# Altium footprint library IC-QFN.PcbLib: 94 footprints (part 6 of 6)
Each footprint in its own frame and in the unit in brackets; x right, y up, seen from the top. Pads: shape width x height; smd on the part's side, far side on the other; paste and mask are expansions set on the pad; w line width, h text height; cw(c..) or ccw(c..) is an arc to the next point about the centre after c.
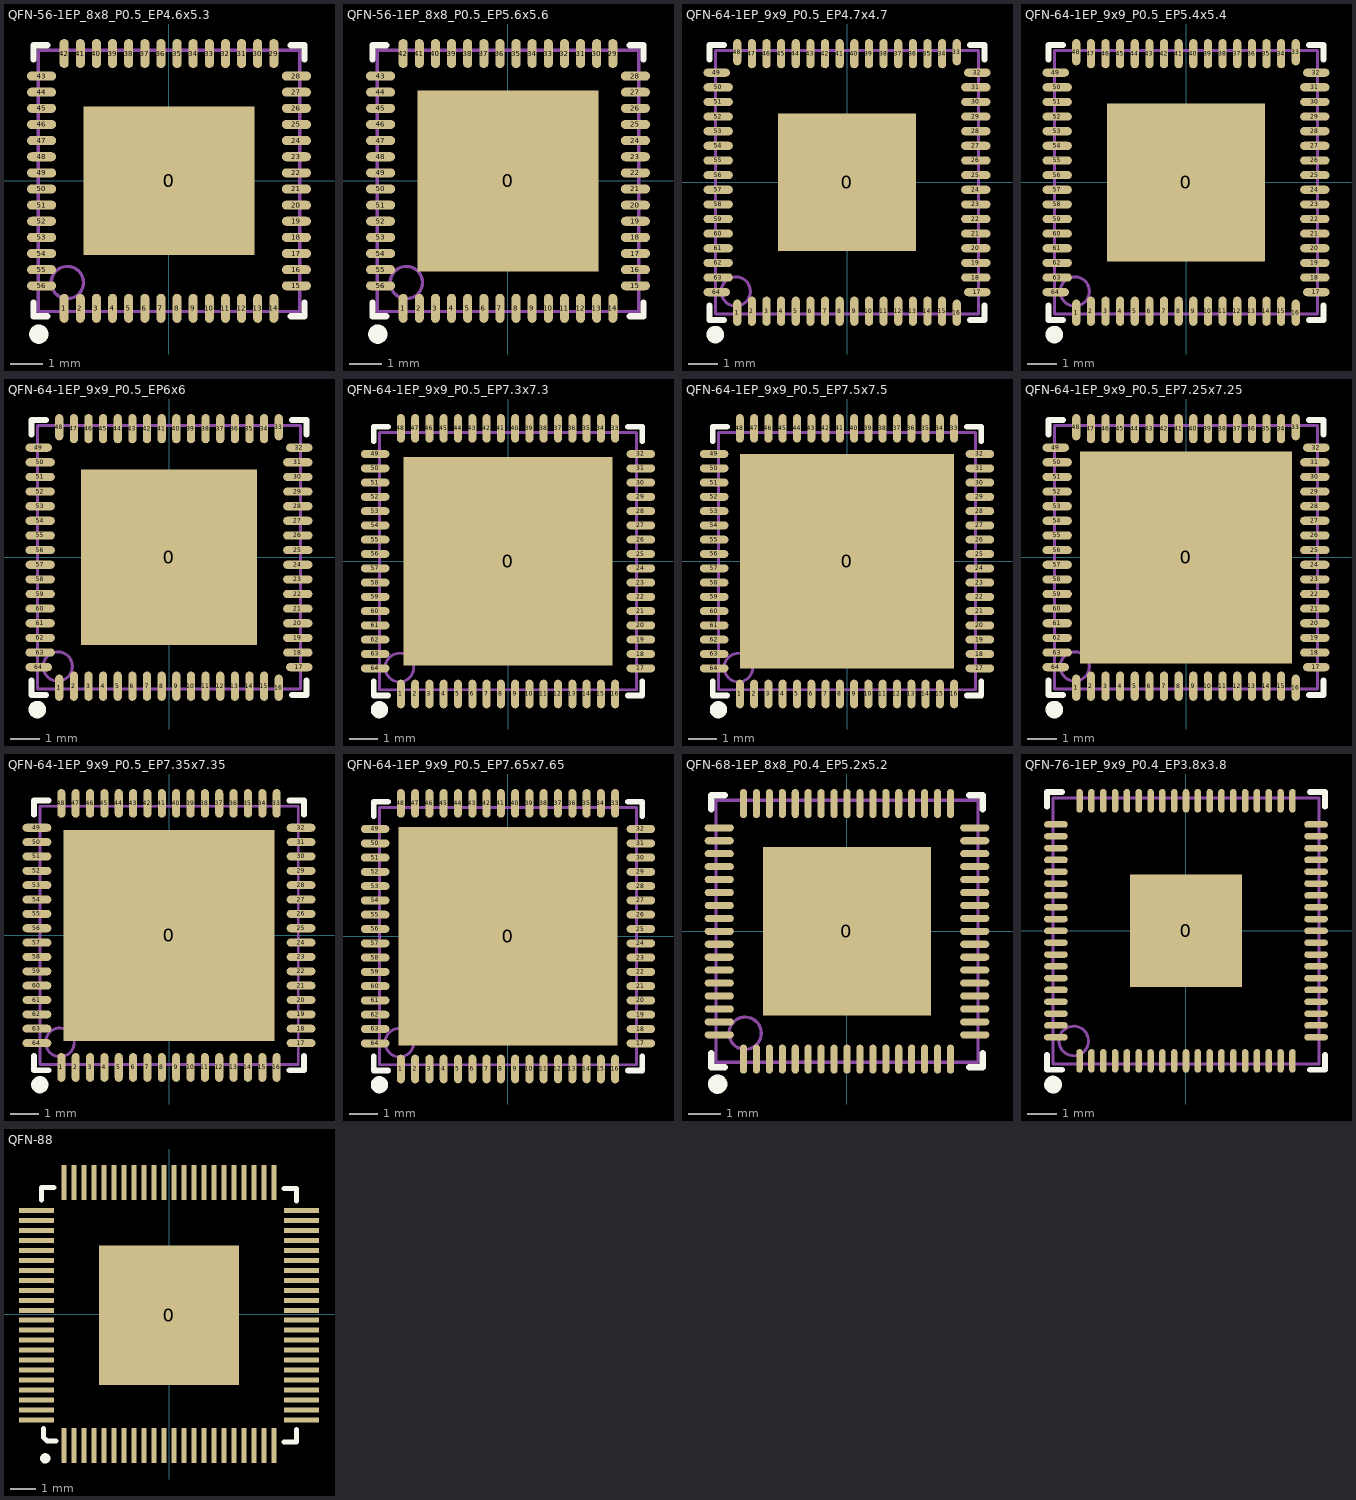
[diagram p5: the footprints below, top view; thin cyan lines are the x and y axes]

## QFN-56-1EP_8x8_P0.5_EP4.6x5.3 [mm]
pads (57):
  rect 5.3x4.6 smd mask+0.051: 0(0,0)
  oval 0.28x0.9 smd mask+0.051: 1(-3.25,-3.95) 2(-2.75,-3.95) 3(-2.25,-3.95) 4(-1.75,-3.95) 5(-1.25,-3.95) 6(-0.75,-3.95) 7(-0.25,-3.95) 8(0.25,-3.95) 9(0.75,-3.95) 10(1.25,-3.95) 11(1.75,-3.95) 12(2.25,-3.95) 13(2.75,-3.95) 14(3.25,-3.95) 29(3.25,3.95) 30(2.75,3.95) 31(2.25,3.95) 32(1.75,3.95) 33(1.25,3.95) 34(0.75,3.95) 35(0.25,3.95) 36(-0.25,3.95) 37(-0.75,3.95) 38(-1.25,3.95) 39(-1.75,3.95) 40(-2.25,3.95) 41(-2.75,3.95) 42(-3.25,3.95)
  oval 0.9x0.28 smd mask+0.051: 15(3.95,-3.25) 16(3.95,-2.75) 17(3.95,-2.25) 18(3.95,-1.75) 19(3.95,-1.25) 20(3.95,-0.75) 21(3.95,-0.25) 22(3.95,0.25) 23(3.95,0.75) 24(3.95,1.25) 25(3.95,1.75) 26(3.95,2.25) 27(3.95,2.75) 28(3.95,3.25) 43(-3.95,3.25) 44(-3.95,2.75) 45(-3.95,2.25) 46(-3.95,1.75) 47(-3.95,1.25) 48(-3.95,0.75) 49(-3.95,0.25) 50(-3.95,-0.25) 51(-3.95,-0.75) 52(-3.95,-1.25) 53(-3.95,-1.75) 54(-3.95,-2.25) 55(-3.95,-2.75) 56(-3.95,-3.25)
Top Overlay:
  circle w0.3: c-4.035,-4.75 r0.15
  lines w0.2: -4.2,-3.775 -4.2,-4.2 -3.775,-4.2 ; -4.2,3.775 -4.2,4.2 -3.775,4.2 ; 3.775,-4.2 4.2,-4.2 4.2,-3.775 ; 3.775,4.2 4.2,4.2 4.2,3.775
Mechanical 13:
  circle w0.1: c-3.15,-3.15 r0.5
  lines w0.1: -4.05,-4.05 4.05,-4.05 4.05,4.05 -4.05,4.05 -4.05,-4.05
3D body "QFN-56-1EP_8x8mm_P0.5mm_EP4.6x5.3mm.step": height 1.1, standoff 0, extent -4,-4 4,4

## QFN-56-1EP_8x8_P0.5_EP5.6x5.6 [mm]
pads (57):
  rect 5.6x5.6 smd mask+0.051: 0(0,0)
  oval 0.28x0.9 smd mask+0.051: 1(-3.25,-3.95) 2(-2.75,-3.95) 3(-2.25,-3.95) 4(-1.75,-3.95) 5(-1.25,-3.95) 6(-0.75,-3.95) 7(-0.25,-3.95) 8(0.25,-3.95) 9(0.75,-3.95) 10(1.25,-3.95) 11(1.75,-3.95) 12(2.25,-3.95) 13(2.75,-3.95) 14(3.25,-3.95) 29(3.25,3.95) 30(2.75,3.95) 31(2.25,3.95) 32(1.75,3.95) 33(1.25,3.95) 34(0.75,3.95) 35(0.25,3.95) 36(-0.25,3.95) 37(-0.75,3.95) 38(-1.25,3.95) 39(-1.75,3.95) 40(-2.25,3.95) 41(-2.75,3.95) 42(-3.25,3.95)
  oval 0.9x0.28 smd mask+0.051: 15(3.95,-3.25) 16(3.95,-2.75) 17(3.95,-2.25) 18(3.95,-1.75) 19(3.95,-1.25) 20(3.95,-0.75) 21(3.95,-0.25) 22(3.95,0.25) 23(3.95,0.75) 24(3.95,1.25) 25(3.95,1.75) 26(3.95,2.25) 27(3.95,2.75) 28(3.95,3.25) 43(-3.95,3.25) 44(-3.95,2.75) 45(-3.95,2.25) 46(-3.95,1.75) 47(-3.95,1.25) 48(-3.95,0.75) 49(-3.95,0.25) 50(-3.95,-0.25) 51(-3.95,-0.75) 52(-3.95,-1.25) 53(-3.95,-1.75) 54(-3.95,-2.25) 55(-3.95,-2.75) 56(-3.95,-3.25)
Top Overlay:
  circle w0.3: c-4.035,-4.75 r0.15
  lines w0.2: -4.2,-3.775 -4.2,-4.2 -3.775,-4.2 ; -4.2,3.775 -4.2,4.2 -3.775,4.2 ; 3.775,-4.2 4.2,-4.2 4.2,-3.775 ; 3.775,4.2 4.2,4.2 4.2,3.775
Mechanical 13:
  circle w0.1: c-3.15,-3.15 r0.5
  lines w0.1: -4.05,-4.05 -4.05,4.05 4.05,4.05 4.05,-4.05 -4.05,-4.05
3D body "QFN-56-1EP_8x8mm_P0.5mm_EP5.6x5.6mm.step": height 1.1, standoff 0, extent -4,-4 4,4

## QFN-64-1EP_8x8_P0.4_EP6.5x6.5 [mm]

## QFN-64-1EP_9x9_P0.5_EP4.7x4.7 [mm]
pads (65):
  rect 4.7x4.7 smd mask+0.051: 0(0,0)
  oval 0.28x0.9 smd mask+0.051: 1(-3.75,-4.45) 16(3.75,-4.45) 33(3.75,4.45) 48(-3.75,4.45)
  oval 0.28x1 smd mask+0.051: 2(-3.25,-4.4) 3(-2.75,-4.4) 4(-2.25,-4.4) 5(-1.75,-4.4) 6(-1.25,-4.4) 7(-0.75,-4.4) 8(-0.25,-4.4) 9(0.25,-4.4) 10(0.75,-4.4) 11(1.25,-4.4) 12(1.75,-4.4) 13(2.25,-4.4) 14(2.75,-4.4) 15(3.25,-4.4) 34(3.25,4.4) 35(2.75,4.4) 36(2.25,4.4) 37(1.75,4.4) 38(1.25,4.4) 39(0.75,4.4) 40(0.25,4.4) 41(-0.25,4.4) 42(-0.75,4.4) 43(-1.25,4.4) 44(-1.75,4.4) 45(-2.25,4.4) 46(-2.75,4.4) 47(-3.25,4.4)
  oval 0.9x0.28 smd mask+0.051: 17(4.45,-3.75) 32(4.45,3.75) 49(-4.45,3.75) 64(-4.45,-3.75)
  oval 1x0.28 smd mask+0.051: 18(4.4,-3.25) 19(4.4,-2.75) 20(4.4,-2.25) 21(4.4,-1.75) 22(4.4,-1.25) 23(4.4,-0.75) 24(4.4,-0.25) 25(4.4,0.25) 26(4.4,0.75) 27(4.4,1.25) 28(4.4,1.75) 29(4.4,2.25) 30(4.4,2.75) 31(4.4,3.25) 50(-4.4,3.25) 51(-4.4,2.75) 52(-4.4,2.25) 53(-4.4,1.75) 54(-4.4,1.25) 55(-4.4,0.75) 56(-4.4,0.25) 57(-4.4,-0.25) 58(-4.4,-0.75) 59(-4.4,-1.25) 60(-4.4,-1.75) 61(-4.4,-2.25) 62(-4.4,-2.75) 63(-4.4,-3.25)
Top Overlay:
  circle w0.3: c-4.5,-5.2 r0.15
  lines w0.2: -4.7,-4.2 -4.7,-4.7 -4.2,-4.7 ; -4.7,4.2 -4.7,4.7 -4.2,4.7 ; 4.2,-4.7 4.7,-4.7 4.7,-4.2 ; 4.2,4.7 4.7,4.7 4.7,4.2
Mechanical 13:
  circle w0.1: c-3.8,-3.725 r0.5
  lines w0.1: -4.5,-4.5 4.5,-4.5 4.5,4.5 -4.5,4.5 -4.5,-4.5
3D body "QFN-64-1EP_9x9mm_P0.5mm_EP4.7x4.7mm.step": height 1.1, standoff 0, extent -4.5,-4.5 4.5,4.5

## QFN-64-1EP_9x9_P0.5_EP5.4x5.4 [mm]
pads (65):
  rect 5.4x5.4 smd mask+0.051: 0(0,0)
  oval 0.28x0.9 smd mask+0.051: 1(-3.75,-4.45) 16(3.75,-4.45) 33(3.75,4.45) 48(-3.75,4.45)
  oval 0.28x1 smd mask+0.051: 2(-3.25,-4.4) 3(-2.75,-4.4) 4(-2.25,-4.4) 5(-1.75,-4.4) 6(-1.25,-4.4) 7(-0.75,-4.4) 8(-0.25,-4.4) 9(0.25,-4.4) 10(0.75,-4.4) 11(1.25,-4.4) 12(1.75,-4.4) 13(2.25,-4.4) 14(2.75,-4.4) 15(3.25,-4.4) 34(3.25,4.4) 35(2.75,4.4) 36(2.25,4.4) 37(1.75,4.4) 38(1.25,4.4) 39(0.75,4.4) 40(0.25,4.4) 41(-0.25,4.4) 42(-0.75,4.4) 43(-1.25,4.4) 44(-1.75,4.4) 45(-2.25,4.4) 46(-2.75,4.4) 47(-3.25,4.4)
  oval 0.9x0.28 smd mask+0.051: 17(4.45,-3.75) 32(4.45,3.75) 49(-4.45,3.75) 64(-4.45,-3.75)
  oval 1x0.28 smd mask+0.051: 18(4.4,-3.25) 19(4.4,-2.75) 20(4.4,-2.25) 21(4.4,-1.75) 22(4.4,-1.25) 23(4.4,-0.75) 24(4.4,-0.25) 25(4.4,0.25) 26(4.4,0.75) 27(4.4,1.25) 28(4.4,1.75) 29(4.4,2.25) 30(4.4,2.75) 31(4.4,3.25) 50(-4.4,3.25) 51(-4.4,2.75) 52(-4.4,2.25) 53(-4.4,1.75) 54(-4.4,1.25) 55(-4.4,0.75) 56(-4.4,0.25) 57(-4.4,-0.25) 58(-4.4,-0.75) 59(-4.4,-1.25) 60(-4.4,-1.75) 61(-4.4,-2.25) 62(-4.4,-2.75) 63(-4.4,-3.25)
Top Overlay:
  circle w0.3: c-4.5,-5.2 r0.15
  lines w0.2: -4.7,-4.2 -4.7,-4.7 -4.2,-4.7 ; -4.7,4.2 -4.7,4.7 -4.2,4.7 ; 4.2,-4.7 4.7,-4.7 4.7,-4.2 ; 4.2,4.7 4.7,4.7 4.7,4.2
Mechanical 13:
  circle w0.1: c-3.8,-3.725 r0.5
  lines w0.1: -4.5,-4.5 4.5,-4.5 4.5,4.5 -4.5,4.5 -4.5,-4.5
3D body "QFN-64-1EP_9x9mm_P0.5mm_EP5.4x5.4mm.step": height 1.1, standoff 0, extent -4.5,-4.5 4.5,4.5

## QFN-64-1EP_9x9_P0.5_EP6x6 [mm]
pads (65):
  rect 6x6 smd mask+0.051: 0(0,0)
  oval 0.28x0.9 smd mask+0.051: 1(-3.75,-4.45) 16(3.75,-4.45) 33(3.75,4.45) 48(-3.75,4.45)
  oval 0.28x1 smd mask+0.051: 2(-3.25,-4.4) 3(-2.75,-4.4) 4(-2.25,-4.4) 5(-1.75,-4.4) 6(-1.25,-4.4) 7(-0.75,-4.4) 8(-0.25,-4.4) 9(0.25,-4.4) 10(0.75,-4.4) 11(1.25,-4.4) 12(1.75,-4.4) 13(2.25,-4.4) 14(2.75,-4.4) 15(3.25,-4.4) 34(3.25,4.4) 35(2.75,4.4) 36(2.25,4.4) 37(1.75,4.4) 38(1.25,4.4) 39(0.75,4.4) 40(0.25,4.4) 41(-0.25,4.4) 42(-0.75,4.4) 43(-1.25,4.4) 44(-1.75,4.4) 45(-2.25,4.4) 46(-2.75,4.4) 47(-3.25,4.4)
  oval 0.9x0.28 smd mask+0.051: 17(4.45,-3.75) 32(4.45,3.75) 49(-4.45,3.75) 64(-4.45,-3.75)
  oval 1x0.28 smd mask+0.051: 18(4.4,-3.25) 19(4.4,-2.75) 20(4.4,-2.25) 21(4.4,-1.75) 22(4.4,-1.25) 23(4.4,-0.75) 24(4.4,-0.25) 25(4.4,0.25) 26(4.4,0.75) 27(4.4,1.25) 28(4.4,1.75) 29(4.4,2.25) 30(4.4,2.75) 31(4.4,3.25) 50(-4.4,3.25) 51(-4.4,2.75) 52(-4.4,2.25) 53(-4.4,1.75) 54(-4.4,1.25) 55(-4.4,0.75) 56(-4.4,0.25) 57(-4.4,-0.25) 58(-4.4,-0.75) 59(-4.4,-1.25) 60(-4.4,-1.75) 61(-4.4,-2.25) 62(-4.4,-2.75) 63(-4.4,-3.25)
Top Overlay:
  circle w0.3: c-4.5,-5.2 r0.15
  lines w0.2: -4.7,-4.2 -4.7,-4.7 -4.2,-4.7 ; -4.7,4.2 -4.7,4.7 -4.2,4.7 ; 4.2,-4.7 4.7,-4.7 4.7,-4.2 ; 4.2,4.7 4.7,4.7 4.7,4.2
Mechanical 13:
  circle w0.1: c-3.8,-3.725 r0.5
  lines w0.1: -4.5,-4.5 -4.5,4.5 4.5,4.5 4.5,-4.5 -4.5,-4.5
3D body "QFN-64-1EP_9x9mm_P0.5mm_EP6x6mm.step": height 1.1, standoff 0, extent -4.5,-4.5 4.5,4.5

## QFN-64-1EP_9x9_P0.5_EP7.3x7.3 [mm]
pads (65):
  rect 7.3x7.3 smd mask+0.102: 0(0,0)
  oval 0.28x1 smd mask+0.051: 1(-3.75,-4.65) 2(-3.25,-4.65) 3(-2.75,-4.65) 4(-2.25,-4.65) 5(-1.75,-4.65) 6(-1.25,-4.65) 7(-0.75,-4.65) 8(-0.25,-4.65) 9(0.25,-4.65) 10(0.75,-4.65) 11(1.25,-4.65) 12(1.75,-4.65) 13(2.25,-4.65) 14(2.75,-4.65) 15(3.25,-4.65) 16(3.75,-4.65) 33(3.75,4.65) 34(3.25,4.65) 35(2.75,4.65) 36(2.25,4.65) 37(1.75,4.65) 38(1.25,4.65) 39(0.75,4.65) 40(0.25,4.65) 41(-0.25,4.65) 42(-0.75,4.65) 43(-1.25,4.65) 44(-1.75,4.65) 45(-2.25,4.65) 46(-2.75,4.65) 47(-3.25,4.65) 48(-3.75,4.65)
  oval 1x0.28 smd mask+0.051: 17(4.65,-3.75) 18(4.65,-3.25) 19(4.65,-2.75) 20(4.65,-2.25) 21(4.65,-1.75) 22(4.65,-1.25) 23(4.65,-0.75) 24(4.65,-0.25) 25(4.65,0.25) 26(4.65,0.75) 27(4.65,1.25) 28(4.65,1.75) 29(4.65,2.25) 30(4.65,2.75) 31(4.65,3.25) 32(4.65,3.75) 49(-4.65,3.75) 50(-4.65,3.25) 51(-4.65,2.75) 52(-4.65,2.25) 53(-4.65,1.75) 54(-4.65,1.25) 55(-4.65,0.75) 56(-4.65,0.25) 57(-4.65,-0.25) 58(-4.65,-0.75) 59(-4.65,-1.25) 60(-4.65,-1.75) 61(-4.65,-2.25) 62(-4.65,-2.75) 63(-4.65,-3.25) 64(-4.65,-3.75)
Top Overlay:
  circle w0.3: c-4.5,-5.2 r0.15
  lines w0.2: -4.7,-4.2 -4.7,-4.7 -4.2,-4.7 ; -4.7,4.2 -4.7,4.7 -4.2,4.7 ; 4.2,-4.7 4.7,-4.7 4.7,-4.2 ; 4.2,4.7 4.7,4.7 4.7,4.2
Mechanical 13:
  circle w0.1: c-3.8,-3.725 r0.5
  lines w0.1: -4.5,-4.5 -4.5,4.5 4.5,4.5 4.5,-4.5 -4.5,-4.5
3D body "QFN-64-1EP_9x9mm_P0.5mm_EP7.3x7.3mm.step": height 1.1, standoff 0, extent -4.5,-4.5 4.5,4.5

## QFN-64-1EP_9x9_P0.5_EP7.5x7.5 [mm]
pads (65):
  rect 7.5x7.5 smd mask+0.051: 0(0,0)
  oval 0.28x1 smd mask+0.051: 1(-3.75,-4.65) 2(-3.25,-4.65) 3(-2.75,-4.65) 4(-2.25,-4.65) 5(-1.75,-4.65) 6(-1.25,-4.65) 7(-0.75,-4.65) 8(-0.25,-4.65) 9(0.25,-4.65) 10(0.75,-4.65) 11(1.25,-4.65) 12(1.75,-4.65) 13(2.25,-4.65) 14(2.75,-4.65) 15(3.25,-4.65) 16(3.75,-4.65) 33(3.75,4.65) 34(3.25,4.65) 35(2.75,4.65) 36(2.25,4.65) 37(1.75,4.65) 38(1.25,4.65) 39(0.75,4.65) 40(0.25,4.65) 41(-0.25,4.65) 42(-0.75,4.65) 43(-1.25,4.65) 44(-1.75,4.65) 45(-2.25,4.65) 46(-2.75,4.65) 47(-3.25,4.65) 48(-3.75,4.65)
  oval 1x0.28 smd mask+0.051: 17(4.65,-3.75) 18(4.65,-3.25) 19(4.65,-2.75) 20(4.65,-2.25) 21(4.65,-1.75) 22(4.65,-1.25) 23(4.65,-0.75) 24(4.65,-0.25) 25(4.65,0.25) 26(4.65,0.75) 27(4.65,1.25) 28(4.65,1.75) 29(4.65,2.25) 30(4.65,2.75) 31(4.65,3.25) 32(4.65,3.75) 49(-4.65,3.75) 50(-4.65,3.25) 51(-4.65,2.75) 52(-4.65,2.25) 53(-4.65,1.75) 54(-4.65,1.25) 55(-4.65,0.75) 56(-4.65,0.25) 57(-4.65,-0.25) 58(-4.65,-0.75) 59(-4.65,-1.25) 60(-4.65,-1.75) 61(-4.65,-2.25) 62(-4.65,-2.75) 63(-4.65,-3.25) 64(-4.65,-3.75)
Top Overlay:
  circle w0.3: c-4.5,-5.2 r0.15
  lines w0.2: -4.7,-4.2 -4.7,-4.7 -4.2,-4.7 ; -4.7,4.2 -4.7,4.7 -4.2,4.7 ; 4.2,-4.7 4.7,-4.7 4.7,-4.2 ; 4.2,4.7 4.7,4.7 4.7,4.2
Mechanical 13:
  circle w0.1: c-3.8,-3.725 r0.5
  lines w0.1: -4.5,-4.5 -4.5,4.5 4.5,4.5 4.5,-4.5 -4.5,-4.5
3D body "QFN-64-1EP_9x9mm_P0.5mm_EP7.5x7.5mm.step": height 1.1, standoff 0, extent -4.5,-4.5 4.5,4.5

## QFN-64-1EP_9x9_P0.5_EP7.25x7.25 [mm]
pads (65):
  rect 7.25x7.25 smd mask+0.051: 0(0,0)
  oval 0.28x0.9 smd mask+0.051: 1(-3.75,-4.45) 16(3.75,-4.45) 33(3.75,4.45) 48(-3.75,4.45)
  oval 0.28x1 smd mask+0.051: 2(-3.25,-4.4) 3(-2.75,-4.4) 4(-2.25,-4.4) 5(-1.75,-4.4) 6(-1.25,-4.4) 7(-0.75,-4.4) 8(-0.25,-4.4) 9(0.25,-4.4) 10(0.75,-4.4) 11(1.25,-4.4) 12(1.75,-4.4) 13(2.25,-4.4) 14(2.75,-4.4) 15(3.25,-4.4) 34(3.25,4.4) 35(2.75,4.4) 36(2.25,4.4) 37(1.75,4.4) 38(1.25,4.4) 39(0.75,4.4) 40(0.25,4.4) 41(-0.25,4.4) 42(-0.75,4.4) 43(-1.25,4.4) 44(-1.75,4.4) 45(-2.25,4.4) 46(-2.75,4.4) 47(-3.25,4.4)
  oval 0.9x0.28 smd mask+0.051: 17(4.45,-3.75) 32(4.45,3.75) 49(-4.45,3.75) 64(-4.45,-3.75)
  oval 1x0.28 smd mask+0.051: 18(4.4,-3.25) 19(4.4,-2.75) 20(4.4,-2.25) 21(4.4,-1.75) 22(4.4,-1.25) 23(4.4,-0.75) 24(4.4,-0.25) 25(4.4,0.25) 26(4.4,0.75) 27(4.4,1.25) 28(4.4,1.75) 29(4.4,2.25) 30(4.4,2.75) 31(4.4,3.25) 50(-4.4,3.25) 51(-4.4,2.75) 52(-4.4,2.25) 53(-4.4,1.75) 54(-4.4,1.25) 55(-4.4,0.75) 56(-4.4,0.25) 57(-4.4,-0.25) 58(-4.4,-0.75) 59(-4.4,-1.25) 60(-4.4,-1.75) 61(-4.4,-2.25) 62(-4.4,-2.75) 63(-4.4,-3.25)
Top Overlay:
  circle w0.3: c-4.5,-5.2 r0.15
  lines w0.2: -4.7,-4.2 -4.7,-4.7 -4.2,-4.7 ; -4.7,4.2 -4.7,4.7 -4.2,4.7 ; 4.2,-4.7 4.7,-4.7 4.7,-4.2 ; 4.2,4.7 4.7,4.7 4.7,4.2
Mechanical 13:
  circle w0.1: c-3.8,-3.725 r0.5
  lines w0.1: -4.5,-4.5 4.5,-4.5 4.5,4.5 -4.5,4.5 -4.5,-4.5
3D body "QFN-64-1EP_9x9mm_P0.5mm_EP7.25x7.25mm.step": height 1.1, standoff 0, extent -4.5,-4.5 4.5,4.5

## QFN-64-1EP_9x9_P0.5_EP7.35x7.35 [mm]
pads (65):
  rect 7.35x7.35 smd mask+0.051: 0(0,0)
  oval 0.28x1 smd mask+0.051: 1(-3.75,-4.6) 2(-3.25,-4.6) 3(-2.75,-4.6) 4(-2.25,-4.6) 5(-1.75,-4.6) 6(-1.25,-4.6) 7(-0.75,-4.6) 8(-0.25,-4.6) 9(0.25,-4.6) 10(0.75,-4.6) 11(1.25,-4.6) 12(1.75,-4.6) 13(2.25,-4.6) 14(2.75,-4.6) 15(3.25,-4.6) 16(3.75,-4.6) 33(3.75,4.6) 34(3.25,4.6) 35(2.75,4.6) 36(2.25,4.6) 37(1.75,4.6) 38(1.25,4.6) 39(0.75,4.6) 40(0.25,4.6) 41(-0.25,4.6) 42(-0.75,4.6) 43(-1.25,4.6) 44(-1.75,4.6) 45(-2.25,4.6) 46(-2.75,4.6) 47(-3.25,4.6) 48(-3.75,4.6)
  oval 1x0.28 smd mask+0.051: 17(4.6,-3.75) 18(4.6,-3.25) 19(4.6,-2.75) 20(4.6,-2.25) 21(4.6,-1.75) 22(4.6,-1.25) 23(4.6,-0.75) 24(4.6,-0.25) 25(4.6,0.25) 26(4.6,0.75) 27(4.6,1.25) 28(4.6,1.75) 29(4.6,2.25) 30(4.6,2.75) 31(4.6,3.25) 32(4.6,3.75) 49(-4.6,3.75) 50(-4.6,3.25) 51(-4.6,2.75) 52(-4.6,2.25) 53(-4.6,1.75) 54(-4.6,1.25) 55(-4.6,0.75) 56(-4.6,0.25) 57(-4.6,-0.25) 58(-4.6,-0.75) 59(-4.6,-1.25) 60(-4.6,-1.75) 61(-4.6,-2.25) 62(-4.6,-2.75) 63(-4.6,-3.25) 64(-4.6,-3.75)
Top Overlay:
  circle w0.3: c-4.5,-5.2 r0.15
  lines w0.2: -4.7,-4.2 -4.7,-4.7 -4.2,-4.7 ; -4.7,4.2 -4.7,4.7 -4.2,4.7 ; 4.2,-4.7 4.7,-4.7 4.7,-4.2 ; 4.2,4.7 4.7,4.7 4.7,4.2
Mechanical 13:
  circle w0.1: c-3.8,-3.725 r0.5
  lines w0.1: -4.5,-4.5 4.5,-4.5 4.5,4.5 -4.5,4.5 -4.5,-4.5
3D body "QFN-64-1EP_9x9mm_P0.5mm_EP7.35x7.35mm.step": height 0.75, standoff 0, extent -4.5,-4.5 4.5,4.5

## QFN-64-1EP_9x9_P0.5_EP7.65x7.65 [mm]
pads (65):
  rect 7.65x7.65 smd mask+0.051: 0(0,0)
  oval 0.28x1 smd mask+0.051: 1(-3.75,-4.65) 2(-3.25,-4.65) 3(-2.75,-4.65) 4(-2.25,-4.65) 5(-1.75,-4.65) 6(-1.25,-4.65) 7(-0.75,-4.65) 8(-0.25,-4.65) 9(0.25,-4.65) 10(0.75,-4.65) 11(1.25,-4.65) 12(1.75,-4.65) 13(2.25,-4.65) 14(2.75,-4.65) 15(3.25,-4.65) 16(3.75,-4.65) 33(3.75,4.65) 34(3.25,4.65) 35(2.75,4.65) 36(2.25,4.65) 37(1.75,4.65) 38(1.25,4.65) 39(0.75,4.65) 40(0.25,4.65) 41(-0.25,4.65) 42(-0.75,4.65) 43(-1.25,4.65) 44(-1.75,4.65) 45(-2.25,4.65) 46(-2.75,4.65) 47(-3.25,4.65) 48(-3.75,4.65)
  oval 1x0.28 smd mask+0.051: 17(4.65,-3.75) 18(4.65,-3.25) 19(4.65,-2.75) 20(4.65,-2.25) 21(4.65,-1.75) 22(4.65,-1.25) 23(4.65,-0.75) 24(4.65,-0.25) 25(4.65,0.25) 26(4.65,0.75) 27(4.65,1.25) 28(4.65,1.75) 29(4.65,2.25) 30(4.65,2.75) 31(4.65,3.25) 32(4.65,3.75) 49(-4.65,3.75) 50(-4.65,3.25) 51(-4.65,2.75) 52(-4.65,2.25) 53(-4.65,1.75) 54(-4.65,1.25) 55(-4.65,0.75) 56(-4.65,0.25) 57(-4.65,-0.25) 58(-4.65,-0.75) 59(-4.65,-1.25) 60(-4.65,-1.75) 61(-4.65,-2.25) 62(-4.65,-2.75) 63(-4.65,-3.25) 64(-4.65,-3.75)
Top Overlay:
  circle w0.3: c-4.5,-5.2 r0.15
  lines w0.2: -4.7,-4.2 -4.7,-4.7 -4.2,-4.7 ; -4.7,4.2 -4.7,4.7 -4.2,4.7 ; 4.2,-4.7 4.7,-4.7 4.7,-4.2 ; 4.2,4.7 4.7,4.7 4.7,4.2
Mechanical 13:
  circle w0.1: c-3.8,-3.725 r0.5
  lines w0.1: -4.5,-4.5 -4.5,4.5 4.5,4.5 4.5,-4.5 -4.5,-4.5
3D body "QFN-64-1EP_9x9mm_P0.5mm_EP7.65x7.65mm.step": height 1.1, standoff 0, extent -4.5,-4.5 4.5,4.5

## QFN-68-1EP_8x8_P0.4_EP5.2x5.2 [mm]
pads (69):
  rect 5.2x5.2 smd: 0(0,0)
  oval 0.22x0.9 smd mask+0.051: 1(-3.2,-3.95) 2(-2.8,-3.95) 3(-2.4,-3.95) 4(-2,-3.95) 5(-1.6,-3.95) 6(-1.2,-3.95) 7(-0.8,-3.95) 8(-0.4,-3.95) 9(0,-3.95) 10(0.4,-3.95) 11(0.8,-3.95) 12(1.2,-3.95) 13(1.6,-3.95) 14(2,-3.95) 15(2.4,-3.95) 16(2.8,-3.95) 17(3.2,-3.95) 35(3.2,3.95) 36(2.8,3.95) 37(2.4,3.95) 38(2,3.95) 39(1.6,3.95) 40(1.2,3.95) 41(0.8,3.95) 42(0.4,3.95) 43(0,3.95) 44(-0.4,3.95) 45(-0.8,3.95) 46(-1.2,3.95) 47(-1.6,3.95) 48(-2,3.95) 49(-2.4,3.95) 50(-2.8,3.95) 51(-3.2,3.95)
  oval 0.9x0.22 smd mask+0.051: 18(3.95,-3.2) 19(3.95,-2.8) 20(3.95,-2.4) 21(3.95,-2) 22(3.95,-1.6) 23(3.95,-1.2) 24(3.95,-0.8) 25(3.95,-0.4) 26(3.95,0) 27(3.95,0.4) 28(3.95,0.8) 29(3.95,1.2) 30(3.95,1.6) 31(3.95,2) 32(3.95,2.4) 33(3.95,2.8) 34(3.95,3.2) 52(-3.95,3.2) 53(-3.95,2.8) 54(-3.95,2.4) 55(-3.95,2) 56(-3.95,1.6) 57(-3.95,1.2) 58(-3.95,0.8) 59(-3.95,0.4) 60(-3.95,0) 61(-3.95,-0.4) 62(-3.95,-0.8) 63(-3.95,-1.2) 64(-3.95,-1.6) 65(-3.95,-2) 66(-3.95,-2.4) 67(-3.95,-2.8) 68(-3.95,-3.2)
Top Overlay:
  circle w0.3: c-4,-4.725 r0.15
  lines w0.2: -4.2,-3.775 -4.2,-4.2 -3.775,-4.2 ; -4.2,3.775 -4.2,4.2 -3.775,4.2 ; 3.775,-4.2 4.2,-4.2 4.2,-3.775 ; 3.775,4.2 4.2,4.2 4.2,3.775
Mechanical 13:
  circle w0.1: c-3.15,-3.15 r0.5
  lines w0.1: -4.05,-4.05 -4.05,4.05 4.05,4.05 4.05,-4.05 -4.05,-4.05
3D body "QFN-68-1EP_8x8mm_P0.4mm_EP5.2x5.2mm.step": height 0.87, standoff 0, extent -4,-4 4,4

## QFN-76-1EP_9x9_P0.4_EP3.8x3.8 [mm]
pads (77):
  rect 3.8x3.8 smd mask+0.051: 0(0,0)
  oval 0.22x0.8 smd mask+0.051: 1(-3.6,-4.4) 2(-3.2,-4.4) 3(-2.8,-4.4) 4(-2.4,-4.4) 5(-2,-4.4) 6(-1.6,-4.4) 7(-1.2,-4.4) 8(-0.8,-4.4) 9(-0.4,-4.4) 10(0,-4.4) 11(0.4,-4.4) 12(0.8,-4.4) 13(1.2,-4.4) 14(1.6,-4.4) 15(2,-4.4) 16(2.4,-4.4) 17(2.8,-4.4) 18(3.2,-4.4) 19(3.6,-4.4) 39(3.6,4.4) 40(3.2,4.4) 41(2.8,4.4) 42(2.4,4.4) 43(2,4.4) 44(1.6,4.4) 45(1.2,4.4) 46(0.8,4.4) 47(0.4,4.4) 48(0,4.4) 49(-0.4,4.4) 50(-0.8,4.4) 51(-1.2,4.4) 52(-1.6,4.4) 53(-2,4.4) 54(-2.4,4.4) 55(-2.8,4.4) 56(-3.2,4.4) 57(-3.6,4.4)
  oval 0.8x0.22 smd mask+0.051: 20(4.4,-3.6) 21(4.4,-3.2) 22(4.4,-2.8) 23(4.4,-2.4) 24(4.4,-2) 25(4.4,-1.6) 26(4.4,-1.2) 27(4.4,-0.8) 28(4.4,-0.4) 29(4.4,0) 30(4.4,0.4) 31(4.4,0.8) 32(4.4,1.2) 33(4.4,1.6) 34(4.4,2) 35(4.4,2.4) 36(4.4,2.8) 37(4.4,3.2) 38(4.4,3.6) 58(-4.4,3.6) 59(-4.4,3.2) 60(-4.4,2.8) 61(-4.4,2.4) 62(-4.4,2) 63(-4.4,1.6) 64(-4.4,1.2) 65(-4.4,0.8) 66(-4.4,0.4) 67(-4.4,0) 68(-4.4,-0.4) 69(-4.4,-0.8) 70(-4.4,-1.2) 71(-4.4,-1.6) 72(-4.4,-2) 73(-4.4,-2.4) 74(-4.4,-2.8) 75(-4.4,-3.2) 76(-4.4,-3.6)
Top Overlay:
  circle w0.3: c-4.5,-5.2 r0.15
  lines w0.2: -4.7,-4.2 -4.7,-4.7 -4.2,-4.7 ; -4.7,4.2 -4.7,4.7 -4.2,4.7 ; 4.2,-4.7 4.7,-4.7 4.7,-4.2 ; 4.2,4.7 4.7,4.7 4.7,4.2
Mechanical 13:
  circle w0.1: c-3.8,-3.725 r0.5
  lines w0.1: -4.5,-4.5 -4.5,4.5 4.5,4.5 4.5,-4.5 -4.5,-4.5
3D body "QFN-76-1EP_9x9mm_P0.4mm_EP3.8x3.8mm.step": height 0.87, standoff 0, extent -4.5,-4.5 4.5,4.5

## QFN-88 [mm]
pads (89):
  rect 5.6x5.6 smd: 0(0,-0.05)
  rect 0.2x1.4 smd: 1(-4.2,-5.25) 2(-3.8,-5.25) 3(-3.4,-5.25) 4(-3,-5.25) 5(-2.6,-5.25) 6(-2.2,-5.25) 7(-1.8,-5.25) 8(-1.4,-5.25) 9(-1,-5.25) 10(-0.6,-5.25) 11(-0.2,-5.25) 12(0.2,-5.25) 13(0.6,-5.25) 14(1,-5.25) 15(1.4,-5.25) 16(1.8,-5.25) 17(2.2,-5.25) 18(2.6,-5.25) 19(3,-5.25) 20(3.4,-5.25) 21(3.8,-5.25) 22(4.2,-5.25) 45(4.2,5.25) 46(3.8,5.25) 47(3.4,5.25) 48(3,5.25) 49(2.6,5.25) 50(2.2,5.25) 51(1.8,5.25) 52(1.4,5.25) 53(1,5.25) 54(0.6,5.25) 55(0.2,5.25) 56(-0.2,5.25) 57(-0.6,5.25) 58(-1,5.25) 59(-1.4,5.25) 60(-1.8,5.25) 61(-2.2,5.25) 62(-2.6,5.25) 63(-3,5.25) 64(-3.4,5.25) 65(-3.8,5.25) 66(-4.2,5.25)
  rect 1.4x0.2 smd: 23(5.3,-4.25) 24(5.3,-3.85) 25(5.3,-3.45) 26(5.3,-3.05) 27(5.3,-2.65) 28(5.3,-2.25) 29(5.3,-1.85) 30(5.3,-1.45) 31(5.3,-1.05) 32(5.3,-0.65) 33(5.3,-0.25) 34(5.3,0.15) 35(5.3,0.55) 36(5.3,0.95) 37(5.3,1.35) 38(5.3,1.75) 39(5.3,2.15) 40(5.3,2.55) 41(5.3,2.95) 42(5.3,3.35) 43(5.3,3.75) 44(5.3,4.15) 67(-5.3,4.15) 68(-5.3,3.75) 69(-5.3,3.35) 70(-5.3,2.95) 71(-5.3,2.55) 72(-5.3,2.15) 73(-5.3,1.75) 74(-5.3,1.35) 75(-5.3,0.95) 76(-5.3,0.55) 77(-5.3,0.15) 78(-5.3,-0.25) 79(-5.3,-0.65) 80(-5.3,-1.05) 81(-5.3,-1.45) 82(-5.3,-1.85) 83(-5.3,-2.25) 84(-5.3,-2.65) 85(-5.3,-3.05) 86(-5.3,-3.45) 87(-5.3,-3.85) 88(-5.3,-4.25)
Top Overlay:
  circle w0.254: c-4.95,-5.775 r0.079
  lines w0.2: -5.1,4.55 -5.1,5.05 -4.6,5.05 ; -5.025,-4.575 -5.025,-4.931 -4.881,-5.075 -4.525,-5.075 ; 4.6,-5.125 5.1,-5.125 5.1,-4.625 ; 4.6,5.025 5.1,5.025 5.1,4.525
3D body "User Library-QFN88.step": height 0.85, standoff -0.02, extent -5.01,-5.041 5.01,4.979